# Altium schematic symbol library ASV-24.SCHLIB: 1 symbol
Pins are listed as number, name and electrical type; pins without a type are passive.

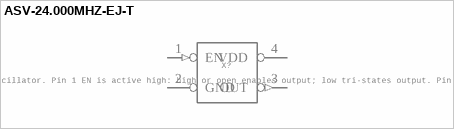
[diagram p0: symbol ASV-24.000MHZ-EJ-T]

## ASV-24.000MHZ-EJ-T
designator X?, comment Abracon ASV 24.000 MHz 3.3 V HCMOS oscillator. Pin 1 EN is active high: high or open enables output; low tri-states output. Pin 2 GND/case, pin 3 output, pin 4 VDD.
GateName_1: G$1; SymbolName_1: ASV_OSCILLATOR; DeviceSetName: ASV-24.000MHZ-EJ-T; LibraryName: ASV-24.000MHZ-EJ-T; Package: ASV_7x5.08mm
footprint ASV_7x5.08mm
pins: 1 EN (in), 2 GND (power), 3 OUT (out), 4 VDD (power)